# Altium footprint library Package_DFN_QFN.PcbLib: 735 footprints (part 42 of 46)
Each footprint in its own frame and in the unit in brackets; x right, y up, seen from the top. Pads: shape width x height; smd on the part's side, far side on the other; paste and mask are expansions set on the pad; w line width, h text height; cw(c..) or ccw(c..) is an arc to the next point about the centre after c.
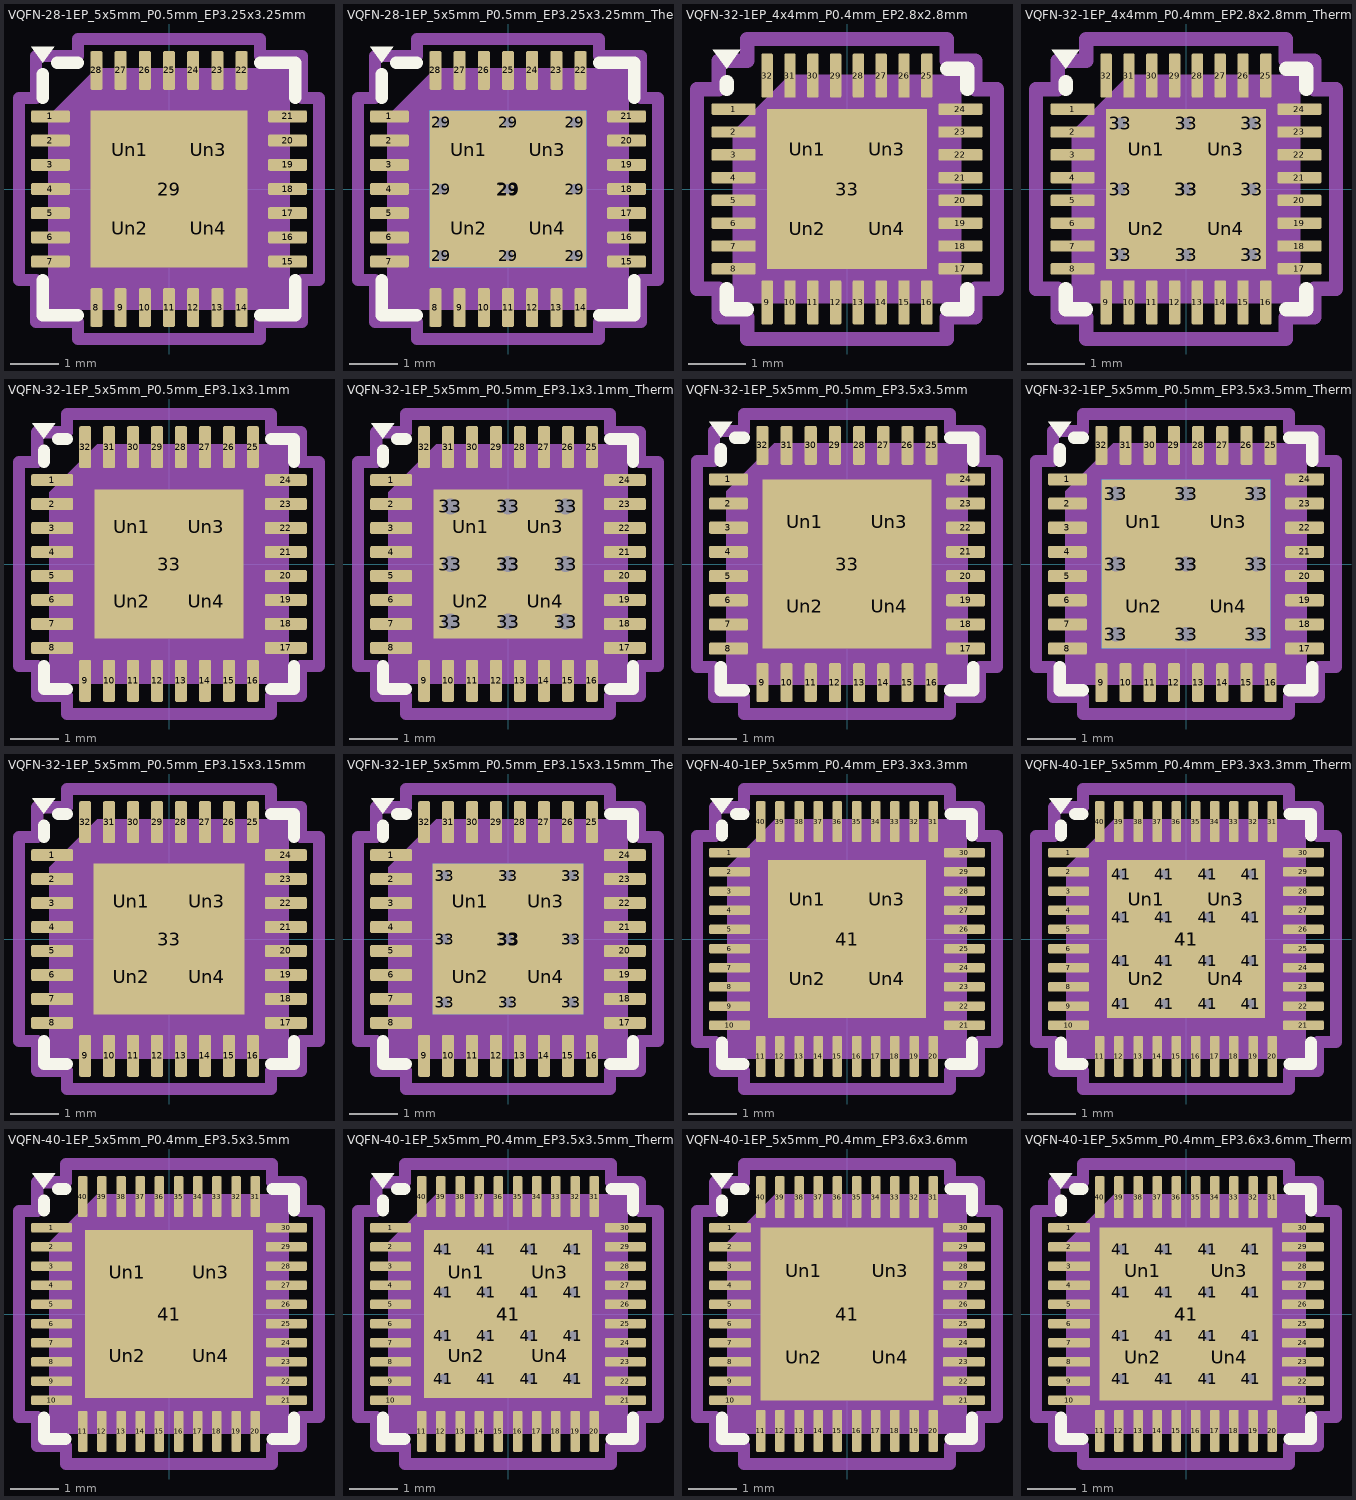
[diagram p41: the footprints below, top view; thin cyan lines are the x and y axes]

## VQFN-28-1EP_5x5mm_P0.5mm_EP3.25x3.25mm [mm] "VQFN-28-1EP_5x5mm_P0.5mm_EP3.25x3.25mm"
pads (33):
  rrect25% 0.8x0.25 smd: 1(-2.45,1.5) 2(-2.45,1) 3(-2.45,0.5) 4(-2.45,0) 5(-2.45,-0.5) 6(-2.45,-1) 7(-2.45,-1.5) 15(2.45,-1.5) 16(2.45,-1) 17(2.45,-0.5) 18(2.45,0) 19(2.45,0.5) 20(2.45,1) 21(2.45,1.5)
  rrect25% 0.25x0.8 smd: 8(-1.5,-2.45) 9(-1,-2.45) 10(-0.5,-2.45) 11(0,-2.45) 12(0.5,-2.45) 13(1,-2.45) 14(1.5,-2.45) 22(1.5,2.45) 23(1,2.45) 24(0.5,2.45) 25(0,2.45) 26(-0.5,2.45) 27(-1,2.45) 28(-1.5,2.45)
  rect 3.25x3.25 smd: 29(0,0)
  rrect19% 1.31x1.31 on Top Paste: Un1(-0.81,0.81) Un2(-0.81,-0.81) Un3(0.81,0.81) Un4(0.81,-0.81)
F.SilkS:
  region: -2.61,2.61 -2.85,2.94 -2.37,2.94
  lines w0.254: -2.61,-1.885 -2.61,-2.61 -1.885,-2.61 ; -2.61,1.885 -2.61,2.37 ; -2.31,2.61 -1.885,2.61 ; 1.885,-2.61 2.61,-2.61 2.61,-1.885 ; 1.885,2.61 2.61,2.61 2.61,1.885
Top Component Center:
  lines w0.127: -0.127,0 0.127,0 -0.127,0 ; 0,-0.127 0,0.127 0,-0.127
Top Assembly:
  region: 2.5,-2.5 -2.5,-2.5 -2.5,1.5 -1.5,2.5 2.5,2.5
Top Courtyard:
  lines w0.254: -3.1,-1.88 -2.75,-1.88 -2.75,-2.75 -1.88,-2.75 -1.88,-3.1 1.88,-3.1 1.88,-2.75 2.75,-2.75 2.75,-1.88 3.1,-1.88 3.1,1.88 2.75,1.88 2.75,2.75 1.88,2.75 1.88,3.1 -1.88,3.1 -1.88,2.75 -2.75,2.75 -2.75,1.88 -3.1,1.88 -3.1,-1.88
Top Designator:
  text ".Designator" at -3.43,-0.344 h1.52

## VQFN-28-1EP_5x5mm_P0.5mm_EP3.25x3.25mm_ThermalVias [mm] "VQFN-28-1EP_5x5mm_P0.5mm_EP3.25x3.25mm_ThermalVias"
pads (43):
  rrect25% 0.8x0.25 smd: 1(-2.45,1.5) 2(-2.45,1) 3(-2.45,0.5) 4(-2.45,0) 5(-2.45,-0.5) 6(-2.45,-1) 7(-2.45,-1.5) 15(2.45,-1.5) 16(2.45,-1) 17(2.45,-0.5) 18(2.45,0) 19(2.45,0.5) 20(2.45,1) 21(2.45,1.5)
  rrect25% 0.25x0.8 smd: 8(-1.5,-2.45) 9(-1,-2.45) 10(-0.5,-2.45) 11(0,-2.45) 12(0.5,-2.45) 13(1,-2.45) 14(1.5,-2.45) 22(1.5,2.45) 23(1,2.45) 24(0.5,2.45) 25(0,2.45) 26(-0.5,2.45) 27(-1,2.45) 28(-1.5,2.45)
  round 0.5 hole 0.2: 29(-1.375,-1.375) 29(-1.375,0) 29(-1.375,1.375) 29(0,-1.375) 29(0,0) 29(0,1.375) 29(1.375,-1.375) 29(1.375,0) 29(1.375,1.375)
  rect 3.25x3.25 smd: 29(0,0)
  rect 3.25x3.25 smd far side: 29(0,0)
  rrect19% 1.31x1.31 on Top Paste: Un1(-0.81,0.81) Un2(-0.81,-0.81) Un3(0.81,0.81) Un4(0.81,-0.81)
F.SilkS:
  region: -2.61,2.61 -2.85,2.94 -2.37,2.94
  lines w0.254: -2.61,-1.885 -2.61,-2.61 -1.885,-2.61 ; -2.61,1.885 -2.61,2.37 ; -2.31,2.61 -1.885,2.61 ; 1.885,-2.61 2.61,-2.61 2.61,-1.885 ; 1.885,2.61 2.61,2.61 2.61,1.885
Top Component Center:
  lines w0.127: -0.127,0 0.127,0 -0.127,0 ; 0,-0.127 0,0.127 0,-0.127
Top Assembly:
  region: 2.5,-2.5 -2.5,-2.5 -2.5,1.5 -1.5,2.5 2.5,2.5
Top Courtyard:
  lines w0.254: -3.1,-1.88 -2.75,-1.88 -2.75,-2.75 -1.88,-2.75 -1.88,-3.1 1.88,-3.1 1.88,-2.75 2.75,-2.75 2.75,-1.88 3.1,-1.88 3.1,1.88 2.75,1.88 2.75,2.75 1.88,2.75 1.88,3.1 -1.88,3.1 -1.88,2.75 -2.75,2.75 -2.75,1.88 -3.1,1.88 -3.1,-1.88
Top Designator:
  text ".Designator" at -3.43,-0.344 h1.52

## VQFN-32-1EP_4x4mm_P0.4mm_EP2.8x2.8mm [mm] "VQFN-32-1EP_4x4mm_P0.4mm_EP2.8x2.8mm"
pads (37):
  rrect25% 0.775x0.2 smd: 1(-1.987,1.4) 2(-1.987,1) 3(-1.987,0.6) 4(-1.987,0.2) 5(-1.987,-0.2) 6(-1.987,-0.6) 7(-1.987,-1) 8(-1.987,-1.4) 17(1.987,-1.4) 18(1.987,-1) 19(1.987,-0.6) 20(1.987,-0.2) 21(1.987,0.2) 22(1.987,0.6) 23(1.987,1) 24(1.987,1.4)
  rrect25% 0.2x0.775 smd: 9(-1.4,-1.987) 10(-1,-1.987) 11(-0.6,-1.987) 12(-0.2,-1.987) 13(0.2,-1.987) 14(0.6,-1.987) 15(1,-1.987) 16(1.4,-1.987) 25(1.4,1.987) 26(1,1.987) 27(0.6,1.987) 28(0.2,1.987) 29(-0.2,1.987) 30(-0.6,1.987) 31(-1,1.987) 32(-1.4,1.987)
  rect 2.8x2.8 smd: 33(0,0)
  rrect22% 1.13x1.13 on Top Paste: Un1(-0.7,0.7) Un2(-0.7,-0.7) Un3(0.7,0.7) Un4(0.7,-0.7)
F.SilkS:
  region: -2.11,2.11 -2.35,2.44 -1.87,2.44
  lines w0.254: -2.11,-1.76 -2.11,-2.11 -1.76,-2.11 ; -2.11,1.76 -2.11,1.87 ; 1.76,-2.11 2.11,-2.11 2.11,-1.76 ; 1.76,2.11 2.11,2.11 2.11,1.76
Top Component Center:
  lines w0.127: -0.127,0 0.127,0 -0.127,0 ; 0,-0.127 0,0.127 0,-0.127
Top Assembly:
  region: 2,-2 -2,-2 -2,1 -1,2 2,2
Top Courtyard:
  lines w0.254: -2.63,-1.75 -2.63,1.75 -2.25,1.75 -2.25,2.25 -1.75,2.25 -1.75,2.63 1.75,2.63 1.75,2.25 2.25,2.25 2.25,1.75 2.63,1.75 2.63,-1.75 2.25,-1.75 2.25,-2.25 1.75,-2.25 1.75,-2.63 -1.75,-2.63 -1.75,-2.25 -2.25,-2.25 -2.25,-1.75 -2.63,-1.75
Top Designator:
  text ".Designator" at -3.43,-0.344 h1.52

## VQFN-32-1EP_4x4mm_P0.4mm_EP2.8x2.8mm_ThermalVias [mm] "VQFN-32-1EP_4x4mm_P0.4mm_EP2.8x2.8mm_ThermalVias"
pads (47):
  rrect25% 0.775x0.2 smd: 1(-1.987,1.4) 2(-1.987,1) 3(-1.987,0.6) 4(-1.987,0.2) 5(-1.987,-0.2) 6(-1.987,-0.6) 7(-1.987,-1) 8(-1.987,-1.4) 17(1.987,-1.4) 18(1.987,-1) 19(1.987,-0.6) 20(1.987,-0.2) 21(1.987,0.2) 22(1.987,0.6) 23(1.987,1) 24(1.987,1.4)
  rrect25% 0.2x0.775 smd: 9(-1.4,-1.987) 10(-1,-1.987) 11(-0.6,-1.987) 12(-0.2,-1.987) 13(0.2,-1.987) 14(0.6,-1.987) 15(1,-1.987) 16(1.4,-1.987) 25(1.4,1.987) 26(1,1.987) 27(0.6,1.987) 28(0.2,1.987) 29(-0.2,1.987) 30(-0.6,1.987) 31(-1,1.987) 32(-1.4,1.987)
  round 0.5 hole 0.2: 33(-1.15,-1.15) 33(-1.15,0) 33(-1.15,1.15) 33(0,-1.15) 33(0,0) 33(0,1.15) 33(1.15,-1.15) 33(1.15,0) 33(1.15,1.15)
  rect 2.8x2.8 smd: 33(0,0)
  rect 2.8x2.8 smd far side: 33(0,0)
  rrect21% 1.17x1.17 on Top Paste: Un1(-0.7,0.7) Un2(-0.7,-0.7) Un3(0.7,0.7) Un4(0.7,-0.7)
F.SilkS:
  region: -2.11,2.11 -2.35,2.44 -1.87,2.44
  lines w0.254: -2.11,-1.76 -2.11,-2.11 -1.76,-2.11 ; -2.11,1.76 -2.11,1.87 ; 1.76,-2.11 2.11,-2.11 2.11,-1.76 ; 1.76,2.11 2.11,2.11 2.11,1.76
Top Component Center:
  lines w0.127: -0.127,0 0.127,0 -0.127,0 ; 0,-0.127 0,0.127 0,-0.127
Top Assembly:
  region: 2,-2 -2,-2 -2,1 -1,2 2,2
Top Courtyard:
  lines w0.254: -2.63,-1.75 -2.63,1.75 -2.25,1.75 -2.25,2.25 -1.75,2.25 -1.75,2.63 1.75,2.63 1.75,2.25 2.25,2.25 2.25,1.75 2.63,1.75 2.63,-1.75 2.25,-1.75 2.25,-2.25 1.75,-2.25 1.75,-2.63 -1.75,-2.63 -1.75,-2.25 -2.25,-2.25 -2.25,-1.75 -2.63,-1.75
Top Designator:
  text ".Designator" at -3.43,-0.344 h1.52

## VQFN-32-1EP_5x5mm_P0.5mm_EP3.1x3.1mm [mm] "VQFN-32-1EP_5x5mm_P0.5mm_EP3.1x3.1mm"
pads (37):
  rrect25% 0.875x0.25 smd: 1(-2.438,1.75) 2(-2.438,1.25) 3(-2.438,0.75) 4(-2.438,0.25) 5(-2.438,-0.25) 6(-2.438,-0.75) 7(-2.438,-1.25) 8(-2.438,-1.75) 17(2.438,-1.75) 18(2.438,-1.25) 19(2.438,-0.75) 20(2.438,-0.25) 21(2.438,0.25) 22(2.438,0.75) 23(2.438,1.25) 24(2.438,1.75)
  rrect25% 0.25x0.875 smd: 9(-1.75,-2.438) 10(-1.25,-2.438) 11(-0.75,-2.438) 12(-0.25,-2.438) 13(0.25,-2.438) 14(0.75,-2.438) 15(1.25,-2.438) 16(1.75,-2.438) 25(1.75,2.438) 26(1.25,2.438) 27(0.75,2.438) 28(0.25,2.438) 29(-0.25,2.438) 30(-0.75,2.438) 31(-1.25,2.438) 32(-1.75,2.438)
  rect 3.1x3.1 smd: 33(0,0)
  rrect20% 1.25x1.25 on Top Paste: Un1(-0.775,0.775) Un2(-0.775,-0.775) Un3(0.775,0.775) Un4(0.775,-0.775)
F.SilkS:
  region: -2.61,2.61 -2.85,2.94 -2.37,2.94
  lines w0.254: -2.61,-2.135 -2.61,-2.61 -2.135,-2.61 ; -2.61,2.135 -2.61,2.37 ; -2.31,2.61 -2.135,2.61 ; 2.135,-2.61 2.61,-2.61 2.61,-2.135 ; 2.135,2.61 2.61,2.61 2.61,2.135
Top Component Center:
  lines w0.127: -0.127,0 0.127,0 -0.127,0 ; 0,-0.127 0,0.127 0,-0.127
Top Assembly:
  region: 2.5,-2.5 -2.5,-2.5 -2.5,1.5 -1.5,2.5 2.5,2.5
Top Courtyard:
  lines w0.254: -3.13,-2.13 -2.75,-2.13 -2.75,-2.75 -2.13,-2.75 -2.13,-3.13 2.13,-3.13 2.13,-2.75 2.75,-2.75 2.75,-2.13 3.13,-2.13 3.13,2.13 2.75,2.13 2.75,2.75 2.13,2.75 2.13,3.13 -2.13,3.13 -2.13,2.75 -2.75,2.75 -2.75,2.13 -3.13,2.13 -3.13,-2.13
Top Designator:
  text ".Designator" at -3.43,-0.344 h1.52

## VQFN-32-1EP_5x5mm_P0.5mm_EP3.1x3.1mm_ThermalVias [mm] "VQFN-32-1EP_5x5mm_P0.5mm_EP3.1x3.1mm_ThermalVias"
pads (47):
  rrect25% 0.875x0.25 smd: 1(-2.438,1.75) 2(-2.438,1.25) 3(-2.438,0.75) 4(-2.438,0.25) 5(-2.438,-0.25) 6(-2.438,-0.75) 7(-2.438,-1.25) 8(-2.438,-1.75) 17(2.438,-1.75) 18(2.438,-1.25) 19(2.438,-0.75) 20(2.438,-0.25) 21(2.438,0.25) 22(2.438,0.75) 23(2.438,1.25) 24(2.438,1.75)
  rrect25% 0.25x0.875 smd: 9(-1.75,-2.438) 10(-1.25,-2.438) 11(-0.75,-2.438) 12(-0.25,-2.438) 13(0.25,-2.438) 14(0.75,-2.438) 15(1.25,-2.438) 16(1.75,-2.438) 25(1.75,2.438) 26(1.25,2.438) 27(0.75,2.438) 28(0.25,2.438) 29(-0.25,2.438) 30(-0.75,2.438) 31(-1.25,2.438) 32(-1.75,2.438)
  round 0.63 hole 0.33: 33(-1.2,-1.2) 33(-1.2,0) 33(-1.2,1.2) 33(0,-1.2) 33(0,0) 33(0,1.2) 33(1.2,-1.2) 33(1.2,0) 33(1.2,1.2)
  rect 3.1x3.1 smd: 33(0,0)
  rect 3.03x3.03 smd far side: 33(0,0)
  rrect19% 1.3x1.3 on Top Paste: Un1(-0.775,0.775) Un2(-0.775,-0.775) Un3(0.775,0.775) Un4(0.775,-0.775)
F.SilkS:
  region: -2.61,2.61 -2.85,2.94 -2.37,2.94
  lines w0.254: -2.61,-2.135 -2.61,-2.61 -2.135,-2.61 ; -2.61,2.135 -2.61,2.37 ; -2.31,2.61 -2.135,2.61 ; 2.135,-2.61 2.61,-2.61 2.61,-2.135 ; 2.135,2.61 2.61,2.61 2.61,2.135
Top Component Center:
  lines w0.127: -0.127,0 0.127,0 -0.127,0 ; 0,-0.127 0,0.127 0,-0.127
Top Assembly:
  region: 2.5,-2.5 -2.5,-2.5 -2.5,1.5 -1.5,2.5 2.5,2.5
Top Courtyard:
  lines w0.254: -3.13,-2.13 -2.75,-2.13 -2.75,-2.75 -2.13,-2.75 -2.13,-3.13 2.13,-3.13 2.13,-2.75 2.75,-2.75 2.75,-2.13 3.13,-2.13 3.13,2.13 2.75,2.13 2.75,2.75 2.13,2.75 2.13,3.13 -2.13,3.13 -2.13,2.75 -2.75,2.75 -2.75,2.13 -3.13,2.13 -3.13,-2.13
Top Designator:
  text ".Designator" at -3.43,-0.344 h1.52

## VQFN-32-1EP_5x5mm_P0.5mm_EP3.5x3.5mm [mm] "VQFN-32-1EP_5x5mm_P0.5mm_EP3.5x3.5mm"
pads (37):
  rrect25% 0.8x0.25 smd: 1(-2.45,1.75) 2(-2.45,1.25) 3(-2.45,0.75) 4(-2.45,0.25) 5(-2.45,-0.25) 6(-2.45,-0.75) 7(-2.45,-1.25) 8(-2.45,-1.75) 17(2.45,-1.75) 18(2.45,-1.25) 19(2.45,-0.75) 20(2.45,-0.25) 21(2.45,0.25) 22(2.45,0.75) 23(2.45,1.25) 24(2.45,1.75)
  rrect25% 0.25x0.8 smd: 9(-1.75,-2.45) 10(-1.25,-2.45) 11(-0.75,-2.45) 12(-0.25,-2.45) 13(0.25,-2.45) 14(0.75,-2.45) 15(1.25,-2.45) 16(1.75,-2.45) 25(1.75,2.45) 26(1.25,2.45) 27(0.75,2.45) 28(0.25,2.45) 29(-0.25,2.45) 30(-0.75,2.45) 31(-1.25,2.45) 32(-1.75,2.45)
  rect 3.5x3.5 smd: 33(0,0)
  rrect18% 1.41x1.41 on Top Paste: Un1(-0.875,0.875) Un2(-0.875,-0.875) Un3(0.875,0.875) Un4(0.875,-0.875)
F.SilkS:
  region: -2.61,2.61 -2.85,2.94 -2.37,2.94
  lines w0.254: -2.61,-2.135 -2.61,-2.61 -2.135,-2.61 ; -2.61,2.135 -2.61,2.37 ; -2.31,2.61 -2.135,2.61 ; 2.135,-2.61 2.61,-2.61 2.61,-2.135 ; 2.135,2.61 2.61,2.61 2.61,2.135
Top Component Center:
  lines w0.127: -0.127,0 0.127,0 -0.127,0 ; 0,-0.127 0,0.127 0,-0.127
Top Assembly:
  region: 2.5,-2.5 -2.5,-2.5 -2.5,1.5 -1.5,2.5 2.5,2.5
Top Courtyard:
  lines w0.254: -3.1,-2.13 -2.75,-2.13 -2.75,-2.75 -2.13,-2.75 -2.13,-3.1 2.13,-3.1 2.13,-2.75 2.75,-2.75 2.75,-2.13 3.1,-2.13 3.1,2.13 2.75,2.13 2.75,2.75 2.13,2.75 2.13,3.1 -2.13,3.1 -2.13,2.75 -2.75,2.75 -2.75,2.13 -3.1,2.13 -3.1,-2.13
Top Designator:
  text ".Designator" at -3.43,-0.344 h1.52

## VQFN-32-1EP_5x5mm_P0.5mm_EP3.5x3.5mm_ThermalVias [mm] "VQFN-32-1EP_5x5mm_P0.5mm_EP3.5x3.5mm_ThermalVias"
pads (47):
  rrect25% 0.8x0.25 smd: 1(-2.45,1.75) 2(-2.45,1.25) 3(-2.45,0.75) 4(-2.45,0.25) 5(-2.45,-0.25) 6(-2.45,-0.75) 7(-2.45,-1.25) 8(-2.45,-1.75) 17(2.45,-1.75) 18(2.45,-1.25) 19(2.45,-0.75) 20(2.45,-0.25) 21(2.45,0.25) 22(2.45,0.75) 23(2.45,1.25) 24(2.45,1.75)
  rrect25% 0.25x0.8 smd: 9(-1.75,-2.45) 10(-1.25,-2.45) 11(-0.75,-2.45) 12(-0.25,-2.45) 13(0.25,-2.45) 14(0.75,-2.45) 15(1.25,-2.45) 16(1.75,-2.45) 25(1.75,2.45) 26(1.25,2.45) 27(0.75,2.45) 28(0.25,2.45) 29(-0.25,2.45) 30(-0.75,2.45) 31(-1.25,2.45) 32(-1.75,2.45)
  round 0.6 hole 0.3: 33(-1.45,-1.45) 33(-1.45,0) 33(-1.45,1.45) 33(0,-1.45) 33(0,0) 33(0,1.45) 33(1.45,-1.45) 33(1.45,0) 33(1.45,1.45)
  rect 3.5x3.5 smd: 33(0,0)
  rect 3.5x3.5 smd far side: 33(0,0)
  rrect17% 1.46x1.46 on Top Paste: Un1(-0.875,0.875) Un2(-0.875,-0.875) Un3(0.875,0.875) Un4(0.875,-0.875)
F.SilkS:
  region: -2.61,2.61 -2.85,2.94 -2.37,2.94
  lines w0.254: -2.61,-2.135 -2.61,-2.61 -2.135,-2.61 ; -2.61,2.135 -2.61,2.37 ; -2.31,2.61 -2.135,2.61 ; 2.135,-2.61 2.61,-2.61 2.61,-2.135 ; 2.135,2.61 2.61,2.61 2.61,2.135
Top Component Center:
  lines w0.127: -0.127,0 0.127,0 -0.127,0 ; 0,-0.127 0,0.127 0,-0.127
Top Assembly:
  region: 2.5,-2.5 -2.5,-2.5 -2.5,1.5 -1.5,2.5 2.5,2.5
Top Courtyard:
  lines w0.254: -3.1,-2.13 -2.75,-2.13 -2.75,-2.75 -2.13,-2.75 -2.13,-3.1 2.13,-3.1 2.13,-2.75 2.75,-2.75 2.75,-2.13 3.1,-2.13 3.1,2.13 2.75,2.13 2.75,2.75 2.13,2.75 2.13,3.1 -2.13,3.1 -2.13,2.75 -2.75,2.75 -2.75,2.13 -3.1,2.13 -3.1,-2.13
Top Designator:
  text ".Designator" at -3.43,-0.344 h1.52

## VQFN-32-1EP_5x5mm_P0.5mm_EP3.15x3.15mm [mm] "VQFN-32-1EP_5x5mm_P0.5mm_EP3.15x3.15mm"
pads (37):
  rrect25% 0.875x0.25 smd: 1(-2.438,1.75) 2(-2.438,1.25) 3(-2.438,0.75) 4(-2.438,0.25) 5(-2.438,-0.25) 6(-2.438,-0.75) 7(-2.438,-1.25) 8(-2.438,-1.75) 17(2.438,-1.75) 18(2.438,-1.25) 19(2.438,-0.75) 20(2.438,-0.25) 21(2.438,0.25) 22(2.438,0.75) 23(2.438,1.25) 24(2.438,1.75)
  rrect25% 0.25x0.875 smd: 9(-1.75,-2.438) 10(-1.25,-2.438) 11(-0.75,-2.438) 12(-0.25,-2.438) 13(0.25,-2.438) 14(0.75,-2.438) 15(1.25,-2.438) 16(1.75,-2.438) 25(1.75,2.438) 26(1.25,2.438) 27(0.75,2.438) 28(0.25,2.438) 29(-0.25,2.438) 30(-0.75,2.438) 31(-1.25,2.438) 32(-1.75,2.438)
  rect 3.15x3.15 smd: 33(0,0)
  rrect20% 1.27x1.27 on Top Paste: Un1(-0.79,0.79) Un2(-0.79,-0.79) Un3(0.79,0.79) Un4(0.79,-0.79)
F.SilkS:
  region: -2.61,2.61 -2.85,2.94 -2.37,2.94
  lines w0.254: -2.61,-2.135 -2.61,-2.61 -2.135,-2.61 ; -2.61,2.135 -2.61,2.37 ; -2.31,2.61 -2.135,2.61 ; 2.135,-2.61 2.61,-2.61 2.61,-2.135 ; 2.135,2.61 2.61,2.61 2.61,2.135
Top Component Center:
  lines w0.127: -0.127,0 0.127,0 -0.127,0 ; 0,-0.127 0,0.127 0,-0.127
Top Assembly:
  region: 2.5,-2.5 -2.5,-2.5 -2.5,1.5 -1.5,2.5 2.5,2.5
Top Courtyard:
  lines w0.254: -3.13,-2.13 -2.75,-2.13 -2.75,-2.75 -2.13,-2.75 -2.13,-3.13 2.13,-3.13 2.13,-2.75 2.75,-2.75 2.75,-2.13 3.13,-2.13 3.13,2.13 2.75,2.13 2.75,2.75 2.13,2.75 2.13,3.13 -2.13,3.13 -2.13,2.75 -2.75,2.75 -2.75,2.13 -3.13,2.13 -3.13,-2.13
Top Designator:
  text ".Designator" at -3.43,-0.344 h1.52

## VQFN-32-1EP_5x5mm_P0.5mm_EP3.15x3.15mm_ThermalVias [mm] "VQFN-32-1EP_5x5mm_P0.5mm_EP3.15x3.15mm_ThermalVias"
pads (47):
  rrect25% 0.875x0.25 smd: 1(-2.438,1.75) 2(-2.438,1.25) 3(-2.438,0.75) 4(-2.438,0.25) 5(-2.438,-0.25) 6(-2.438,-0.75) 7(-2.438,-1.25) 8(-2.438,-1.75) 17(2.438,-1.75) 18(2.438,-1.25) 19(2.438,-0.75) 20(2.438,-0.25) 21(2.438,0.25) 22(2.438,0.75) 23(2.438,1.25) 24(2.438,1.75)
  rrect25% 0.25x0.875 smd: 9(-1.75,-2.438) 10(-1.25,-2.438) 11(-0.75,-2.438) 12(-0.25,-2.438) 13(0.25,-2.438) 14(0.75,-2.438) 15(1.25,-2.438) 16(1.75,-2.438) 25(1.75,2.438) 26(1.25,2.438) 27(0.75,2.438) 28(0.25,2.438) 29(-0.25,2.438) 30(-0.75,2.438) 31(-1.25,2.438) 32(-1.75,2.438)
  round 0.5 hole 0.2: 33(-1.325,-1.325) 33(-1.325,0) 33(-1.325,1.325) 33(0,-1.325) 33(0,0) 33(0,1.325) 33(1.325,-1.325) 33(1.325,0) 33(1.325,1.325)
  rect 3.15x3.15 smd: 33(0,0)
  rect 3.15x3.15 smd far side: 33(0,0)
  rrect20% 1.27x1.27 on Top Paste: Un1(-0.79,0.79) Un2(-0.79,-0.79) Un3(0.79,0.79) Un4(0.79,-0.79)
F.SilkS:
  region: -2.61,2.61 -2.85,2.94 -2.37,2.94
  lines w0.254: -2.61,-2.135 -2.61,-2.61 -2.135,-2.61 ; -2.61,2.135 -2.61,2.37 ; -2.31,2.61 -2.135,2.61 ; 2.135,-2.61 2.61,-2.61 2.61,-2.135 ; 2.135,2.61 2.61,2.61 2.61,2.135
Top Component Center:
  lines w0.127: -0.127,0 0.127,0 -0.127,0 ; 0,-0.127 0,0.127 0,-0.127
Top Assembly:
  region: 2.5,-2.5 -2.5,-2.5 -2.5,1.5 -1.5,2.5 2.5,2.5
Top Courtyard:
  lines w0.254: -3.13,-2.13 -2.75,-2.13 -2.75,-2.75 -2.13,-2.75 -2.13,-3.13 2.13,-3.13 2.13,-2.75 2.75,-2.75 2.75,-2.13 3.13,-2.13 3.13,2.13 2.75,2.13 2.75,2.75 2.13,2.75 2.13,3.13 -2.13,3.13 -2.13,2.75 -2.75,2.75 -2.75,2.13 -3.13,2.13 -3.13,-2.13
Top Designator:
  text ".Designator" at -3.43,-0.344 h1.52

## VQFN-40-1EP_5x5mm_P0.4mm_EP3.3x3.3mm [mm] "VQFN-40-1EP_5x5mm_P0.4mm_EP3.3x3.3mm"
pads (45):
  rrect25% 0.85x0.2 smd: 1(-2.45,1.8) 2(-2.45,1.4) 3(-2.45,1) 4(-2.45,0.6) 5(-2.45,0.2) 6(-2.45,-0.2) 7(-2.45,-0.6) 8(-2.45,-1) 9(-2.45,-1.4) 10(-2.45,-1.8) 21(2.45,-1.8) 22(2.45,-1.4) 23(2.45,-1) 24(2.45,-0.6) 25(2.45,-0.2) 26(2.45,0.2) 27(2.45,0.6) 28(2.45,1) 29(2.45,1.4) 30(2.45,1.8)
  rrect25% 0.2x0.85 smd: 11(-1.8,-2.45) 12(-1.4,-2.45) 13(-1,-2.45) 14(-0.6,-2.45) 15(-0.2,-2.45) 16(0.2,-2.45) 17(0.6,-2.45) 18(1,-2.45) 19(1.4,-2.45) 20(1.8,-2.45) 31(1.8,2.45) 32(1.4,2.45) 33(1,2.45) 34(0.6,2.45) 35(0.2,2.45) 36(-0.2,2.45) 37(-0.6,2.45) 38(-1,2.45) 39(-1.4,2.45) 40(-1.8,2.45)
  rect 3.3x3.3 smd: 41(0,0)
  rrect19% 1.33x1.33 on Top Paste: Un1(-0.825,0.825) Un2(-0.825,-0.825) Un3(0.825,0.825) Un4(0.825,-0.825)
F.SilkS:
  region: -2.61,2.61 -2.85,2.94 -2.37,2.94
  lines w0.254: -2.61,-2.16 -2.61,-2.61 -2.16,-2.61 ; -2.61,2.16 -2.61,2.37 ; -2.31,2.61 -2.16,2.61 ; 2.16,-2.61 2.61,-2.61 2.61,-2.16 ; 2.16,2.61 2.61,2.61 2.61,2.16
Top Component Center:
  lines w0.127: -0.127,0 0.127,0 -0.127,0 ; 0,-0.127 0,0.127 0,-0.127
Top Assembly:
  region: 2.5,-2.5 -2.5,-2.5 -2.5,1.5 -1.5,2.5 2.5,2.5
Top Courtyard:
  lines w0.254: -3.13,-2.15 -2.75,-2.15 -2.75,-2.75 -2.15,-2.75 -2.15,-3.13 2.15,-3.13 2.15,-2.75 2.75,-2.75 2.75,-2.15 3.13,-2.15 3.13,2.15 2.75,2.15 2.75,2.75 2.15,2.75 2.15,3.13 -2.15,3.13 -2.15,2.75 -2.75,2.75 -2.75,2.15 -3.13,2.15 -3.13,-2.15
Top Designator:
  text ".Designator" at -3.43,-0.344 h1.52

## VQFN-40-1EP_5x5mm_P0.4mm_EP3.3x3.3mm_ThermalVias [mm] "VQFN-40-1EP_5x5mm_P0.4mm_EP3.3x3.3mm_ThermalVias"
pads (62):
  rrect25% 0.85x0.2 smd: 1(-2.45,1.8) 2(-2.45,1.4) 3(-2.45,1) 4(-2.45,0.6) 5(-2.45,0.2) 6(-2.45,-0.2) 7(-2.45,-0.6) 8(-2.45,-1) 9(-2.45,-1.4) 10(-2.45,-1.8) 21(2.45,-1.8) 22(2.45,-1.4) 23(2.45,-1) 24(2.45,-0.6) 25(2.45,-0.2) 26(2.45,0.2) 27(2.45,0.6) 28(2.45,1) 29(2.45,1.4) 30(2.45,1.8)
  rrect25% 0.2x0.85 smd: 11(-1.8,-2.45) 12(-1.4,-2.45) 13(-1,-2.45) 14(-0.6,-2.45) 15(-0.2,-2.45) 16(0.2,-2.45) 17(0.6,-2.45) 18(1,-2.45) 19(1.4,-2.45) 20(1.8,-2.45) 31(1.8,2.45) 32(1.4,2.45) 33(1,2.45) 34(0.6,2.45) 35(0.2,2.45) 36(-0.2,2.45) 37(-0.6,2.45) 38(-1,2.45) 39(-1.4,2.45) 40(-1.8,2.45)
  round 0.5 hole 0.2: 41(-1.35,-1.35) 41(-1.35,-0.45) 41(-1.35,0.45) 41(-1.35,1.35) 41(-0.45,-1.35) 41(-0.45,-0.45) 41(-0.45,0.45) 41(-0.45,1.35) 41(0.45,-1.35) 41(0.45,-0.45) 41(0.45,0.45) 41(0.45,1.35) 41(1.35,-1.35) 41(1.35,-0.45) 41(1.35,0.45) 41(1.35,1.35)
  rect 3.3x3.3 smd: 41(0,0)
  rect 3.2x3.2 smd far side: 41(0,0)
  rrect17% 1.43x1.43 on Top Paste: Un1(-0.825,0.825) Un2(-0.825,-0.825) Un3(0.825,0.825) Un4(0.825,-0.825)
F.SilkS:
  region: -2.61,2.61 -2.85,2.94 -2.37,2.94
  lines w0.254: -2.61,-2.16 -2.61,-2.61 -2.16,-2.61 ; -2.61,2.16 -2.61,2.37 ; -2.31,2.61 -2.16,2.61 ; 2.16,-2.61 2.61,-2.61 2.61,-2.16 ; 2.16,2.61 2.61,2.61 2.61,2.16
Top Component Center:
  lines w0.127: -0.127,0 0.127,0 -0.127,0 ; 0,-0.127 0,0.127 0,-0.127
Top Assembly:
  region: 2.5,-2.5 -2.5,-2.5 -2.5,1.5 -1.5,2.5 2.5,2.5
Top Courtyard:
  lines w0.254: -3.13,-2.15 -2.75,-2.15 -2.75,-2.75 -2.15,-2.75 -2.15,-3.13 2.15,-3.13 2.15,-2.75 2.75,-2.75 2.75,-2.15 3.13,-2.15 3.13,2.15 2.75,2.15 2.75,2.75 2.15,2.75 2.15,3.13 -2.15,3.13 -2.15,2.75 -2.75,2.75 -2.75,2.15 -3.13,2.15 -3.13,-2.15
Top Designator:
  text ".Designator" at -3.43,-0.344 h1.52

## VQFN-40-1EP_5x5mm_P0.4mm_EP3.5x3.5mm [mm] "VQFN-40-1EP_5x5mm_P0.4mm_EP3.5x3.5mm"
pads (45):
  rrect25% 0.85x0.2 smd: 1(-2.45,1.8) 2(-2.45,1.4) 3(-2.45,1) 4(-2.45,0.6) 5(-2.45,0.2) 6(-2.45,-0.2) 7(-2.45,-0.6) 8(-2.45,-1) 9(-2.45,-1.4) 10(-2.45,-1.8) 21(2.45,-1.8) 22(2.45,-1.4) 23(2.45,-1) 24(2.45,-0.6) 25(2.45,-0.2) 26(2.45,0.2) 27(2.45,0.6) 28(2.45,1) 29(2.45,1.4) 30(2.45,1.8)
  rrect25% 0.2x0.85 smd: 11(-1.8,-2.45) 12(-1.4,-2.45) 13(-1,-2.45) 14(-0.6,-2.45) 15(-0.2,-2.45) 16(0.2,-2.45) 17(0.6,-2.45) 18(1,-2.45) 19(1.4,-2.45) 20(1.8,-2.45) 31(1.8,2.45) 32(1.4,2.45) 33(1,2.45) 34(0.6,2.45) 35(0.2,2.45) 36(-0.2,2.45) 37(-0.6,2.45) 38(-1,2.45) 39(-1.4,2.45) 40(-1.8,2.45)
  rect 3.5x3.5 smd: 41(0,0)
  rrect18% 1.41x1.41 on Top Paste: Un1(-0.875,0.875) Un2(-0.875,-0.875) Un3(0.875,0.875) Un4(0.875,-0.875)
F.SilkS:
  region: -2.61,2.61 -2.85,2.94 -2.37,2.94
  lines w0.254: -2.61,-2.16 -2.61,-2.61 -2.16,-2.61 ; -2.61,2.16 -2.61,2.37 ; -2.31,2.61 -2.16,2.61 ; 2.16,-2.61 2.61,-2.61 2.61,-2.16 ; 2.16,2.61 2.61,2.61 2.61,2.16
Top Component Center:
  lines w0.127: -0.127,0 0.127,0 -0.127,0 ; 0,-0.127 0,0.127 0,-0.127
Top Assembly:
  region: 2.5,-2.5 -2.5,-2.5 -2.5,1.5 -1.5,2.5 2.5,2.5
Top Courtyard:
  lines w0.254: -3.13,-2.15 -2.75,-2.15 -2.75,-2.75 -2.15,-2.75 -2.15,-3.13 2.15,-3.13 2.15,-2.75 2.75,-2.75 2.75,-2.15 3.13,-2.15 3.13,2.15 2.75,2.15 2.75,2.75 2.15,2.75 2.15,3.13 -2.15,3.13 -2.15,2.75 -2.75,2.75 -2.75,2.15 -3.13,2.15 -3.13,-2.15
Top Designator:
  text ".Designator" at -3.43,-0.344 h1.52

## VQFN-40-1EP_5x5mm_P0.4mm_EP3.5x3.5mm_ThermalVias [mm] "VQFN-40-1EP_5x5mm_P0.4mm_EP3.5x3.5mm_ThermalVias"
pads (62):
  rrect25% 0.85x0.2 smd: 1(-2.45,1.8) 2(-2.45,1.4) 3(-2.45,1) 4(-2.45,0.6) 5(-2.45,0.2) 6(-2.45,-0.2) 7(-2.45,-0.6) 8(-2.45,-1) 9(-2.45,-1.4) 10(-2.45,-1.8) 21(2.45,-1.8) 22(2.45,-1.4) 23(2.45,-1) 24(2.45,-0.6) 25(2.45,-0.2) 26(2.45,0.2) 27(2.45,0.6) 28(2.45,1) 29(2.45,1.4) 30(2.45,1.8)
  rrect25% 0.2x0.85 smd: 11(-1.8,-2.45) 12(-1.4,-2.45) 13(-1,-2.45) 14(-0.6,-2.45) 15(-0.2,-2.45) 16(0.2,-2.45) 17(0.6,-2.45) 18(1,-2.45) 19(1.4,-2.45) 20(1.8,-2.45) 31(1.8,2.45) 32(1.4,2.45) 33(1,2.45) 34(0.6,2.45) 35(0.2,2.45) 36(-0.2,2.45) 37(-0.6,2.45) 38(-1,2.45) 39(-1.4,2.45) 40(-1.8,2.45)
  round 0.5 hole 0.2: 41(-1.35,-1.35) 41(-1.35,-0.45) 41(-1.35,0.45) 41(-1.35,1.35) 41(-0.45,-1.35) 41(-0.45,-0.45) 41(-0.45,0.45) 41(-0.45,1.35) 41(0.45,-1.35) 41(0.45,-0.45) 41(0.45,0.45) 41(0.45,1.35) 41(1.35,-1.35) 41(1.35,-0.45) 41(1.35,0.45) 41(1.35,1.35)
  rect 3.5x3.5 smd: 41(0,0)
  rect 3.2x3.2 smd far side: 41(0,0)
  rrect16% 1.52x1.52 on Top Paste: Un1(-0.875,0.875) Un2(-0.875,-0.875) Un3(0.875,0.875) Un4(0.875,-0.875)
F.SilkS:
  region: -2.61,2.61 -2.85,2.94 -2.37,2.94
  lines w0.254: -2.61,-2.16 -2.61,-2.61 -2.16,-2.61 ; -2.61,2.16 -2.61,2.37 ; -2.31,2.61 -2.16,2.61 ; 2.16,-2.61 2.61,-2.61 2.61,-2.16 ; 2.16,2.61 2.61,2.61 2.61,2.16
Top Component Center:
  lines w0.127: -0.127,0 0.127,0 -0.127,0 ; 0,-0.127 0,0.127 0,-0.127
Top Assembly:
  region: 2.5,-2.5 -2.5,-2.5 -2.5,1.5 -1.5,2.5 2.5,2.5
Top Courtyard:
  lines w0.254: -3.13,-2.15 -2.75,-2.15 -2.75,-2.75 -2.15,-2.75 -2.15,-3.13 2.15,-3.13 2.15,-2.75 2.75,-2.75 2.75,-2.15 3.13,-2.15 3.13,2.15 2.75,2.15 2.75,2.75 2.15,2.75 2.15,3.13 -2.15,3.13 -2.15,2.75 -2.75,2.75 -2.75,2.15 -3.13,2.15 -3.13,-2.15
Top Designator:
  text ".Designator" at -3.43,-0.344 h1.52

## VQFN-40-1EP_5x5mm_P0.4mm_EP3.6x3.6mm [mm] "VQFN-40-1EP_5x5mm_P0.4mm_EP3.6x3.6mm"
pads (45):
  rrect25% 0.875x0.2 smd: 1(-2.438,1.8) 2(-2.438,1.4) 3(-2.438,1) 4(-2.438,0.6) 5(-2.438,0.2) 6(-2.438,-0.2) 7(-2.438,-0.6) 8(-2.438,-1) 9(-2.438,-1.4) 10(-2.438,-1.8) 21(2.438,-1.8) 22(2.438,-1.4) 23(2.438,-1) 24(2.438,-0.6) 25(2.438,-0.2) 26(2.438,0.2) 27(2.438,0.6) 28(2.438,1) 29(2.438,1.4) 30(2.438,1.8)
  rrect25% 0.2x0.875 smd: 11(-1.8,-2.438) 12(-1.4,-2.438) 13(-1,-2.438) 14(-0.6,-2.438) 15(-0.2,-2.438) 16(0.2,-2.438) 17(0.6,-2.438) 18(1,-2.438) 19(1.4,-2.438) 20(1.8,-2.438) 31(1.8,2.438) 32(1.4,2.438) 33(1,2.438) 34(0.6,2.438) 35(0.2,2.438) 36(-0.2,2.438) 37(-0.6,2.438) 38(-1,2.438) 39(-1.4,2.438) 40(-1.8,2.438)
  rect 3.6x3.6 smd: 41(0,0)
  rrect17% 1.45x1.45 on Top Paste: Un1(-0.9,0.9) Un2(-0.9,-0.9) Un3(0.9,0.9) Un4(0.9,-0.9)
F.SilkS:
  region: -2.61,2.61 -2.85,2.94 -2.37,2.94
  lines w0.254: -2.61,-2.16 -2.61,-2.61 -2.16,-2.61 ; -2.61,2.16 -2.61,2.37 ; -2.31,2.61 -2.16,2.61 ; 2.16,-2.61 2.61,-2.61 2.61,-2.16 ; 2.16,2.61 2.61,2.61 2.61,2.16
Top Component Center:
  lines w0.127: -0.127,0 0.127,0 -0.127,0 ; 0,-0.127 0,0.127 0,-0.127
Top Assembly:
  region: 2.5,-2.5 -2.5,-2.5 -2.5,1.5 -1.5,2.5 2.5,2.5
Top Courtyard:
  lines w0.254: -3.13,-2.15 -2.75,-2.15 -2.75,-2.75 -2.15,-2.75 -2.15,-3.13 2.15,-3.13 2.15,-2.75 2.75,-2.75 2.75,-2.15 3.13,-2.15 3.13,2.15 2.75,2.15 2.75,2.75 2.15,2.75 2.15,3.13 -2.15,3.13 -2.15,2.75 -2.75,2.75 -2.75,2.15 -3.13,2.15 -3.13,-2.15
Top Designator:
  text ".Designator" at -3.43,-0.344 h1.52

## VQFN-40-1EP_5x5mm_P0.4mm_EP3.6x3.6mm_ThermalVias [mm] "VQFN-40-1EP_5x5mm_P0.4mm_EP3.6x3.6mm_ThermalVias"
pads (62):
  rrect25% 0.875x0.2 smd: 1(-2.438,1.8) 2(-2.438,1.4) 3(-2.438,1) 4(-2.438,0.6) 5(-2.438,0.2) 6(-2.438,-0.2) 7(-2.438,-0.6) 8(-2.438,-1) 9(-2.438,-1.4) 10(-2.438,-1.8) 21(2.438,-1.8) 22(2.438,-1.4) 23(2.438,-1) 24(2.438,-0.6) 25(2.438,-0.2) 26(2.438,0.2) 27(2.438,0.6) 28(2.438,1) 29(2.438,1.4) 30(2.438,1.8)
  rrect25% 0.2x0.875 smd: 11(-1.8,-2.438) 12(-1.4,-2.438) 13(-1,-2.438) 14(-0.6,-2.438) 15(-0.2,-2.438) 16(0.2,-2.438) 17(0.6,-2.438) 18(1,-2.438) 19(1.4,-2.438) 20(1.8,-2.438) 31(1.8,2.438) 32(1.4,2.438) 33(1,2.438) 34(0.6,2.438) 35(0.2,2.438) 36(-0.2,2.438) 37(-0.6,2.438) 38(-1,2.438) 39(-1.4,2.438) 40(-1.8,2.438)
  round 0.5 hole 0.2: 41(-1.35,-1.35) 41(-1.35,-0.45) 41(-1.35,0.45) 41(-1.35,1.35) 41(-0.45,-1.35) 41(-0.45,-0.45) 41(-0.45,0.45) 41(-0.45,1.35) 41(0.45,-1.35) 41(0.45,-0.45) 41(0.45,0.45) 41(0.45,1.35) 41(1.35,-1.35) 41(1.35,-0.45) 41(1.35,0.45) 41(1.35,1.35)
  rect 3.6x3.6 smd: 41(0,0)
  rect 3.2x3.2 smd far side: 41(0,0)
  rrect16% 1.56x1.56 on Top Paste: Un1(-0.9,0.9) Un2(-0.9,-0.9) Un3(0.9,0.9) Un4(0.9,-0.9)
F.SilkS:
  region: -2.61,2.61 -2.85,2.94 -2.37,2.94
  lines w0.254: -2.61,-2.16 -2.61,-2.61 -2.16,-2.61 ; -2.61,2.16 -2.61,2.37 ; -2.31,2.61 -2.16,2.61 ; 2.16,-2.61 2.61,-2.61 2.61,-2.16 ; 2.16,2.61 2.61,2.61 2.61,2.16
Top Component Center:
  lines w0.127: -0.127,0 0.127,0 -0.127,0 ; 0,-0.127 0,0.127 0,-0.127
Top Assembly:
  region: 2.5,-2.5 -2.5,-2.5 -2.5,1.5 -1.5,2.5 2.5,2.5
Top Courtyard:
  lines w0.254: -3.13,-2.15 -2.75,-2.15 -2.75,-2.75 -2.15,-2.75 -2.15,-3.13 2.15,-3.13 2.15,-2.75 2.75,-2.75 2.75,-2.15 3.13,-2.15 3.13,2.15 2.75,2.15 2.75,2.75 2.15,2.75 2.15,3.13 -2.15,3.13 -2.15,2.75 -2.75,2.75 -2.75,2.15 -3.13,2.15 -3.13,-2.15
Top Designator:
  text ".Designator" at -3.43,-0.344 h1.52